# Altium footprint library KF127-5.08-2P.PcbLib: 1 footprints
Each footprint in its own frame and in the unit in brackets; x right, y up, seen from the top. Pads: shape width x height; smd on the part's side, far side on the other; paste and mask are expansions set on the pad; w line width, h text height; cw(c..) or ccw(c..) is an arc to the next point about the centre after c.
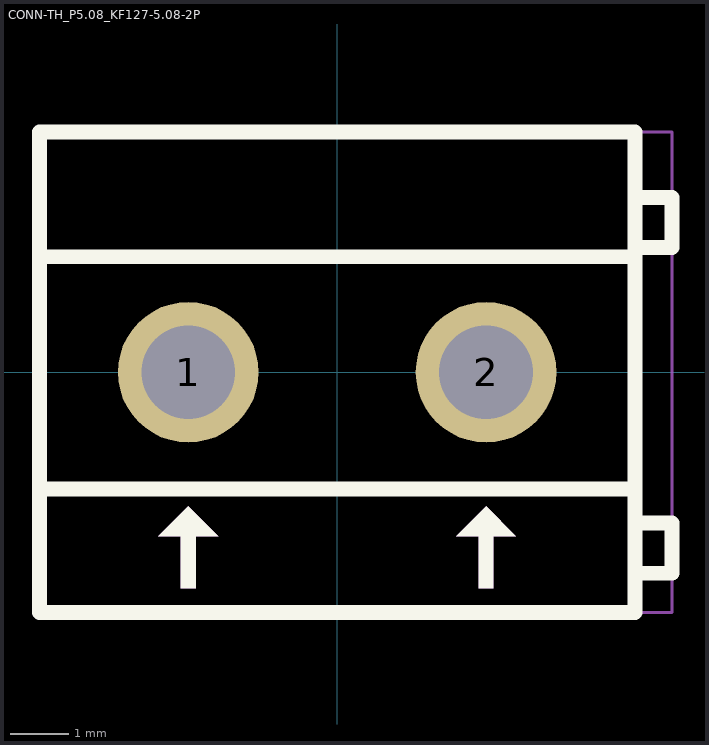
[diagram p0: the footprint, top view; thin cyan lines are the x and y axes]

## CONN-TH_P5.08_KF127-5.08-2P [mm]
pads (2):
  round 2.4 hole 1.6: 1(-2.54,0) 2(2.54,0)
Top Overlay:
  region: 2.54,-2.286 2.032,-2.794 2.413,-2.794 2.413,-3.683 2.667,-3.683 2.667,-2.794 3.048,-2.794
  region: -2.54,-2.286 -3.048,-2.794 -2.667,-2.794 -2.667,-3.683 -2.413,-3.683 -2.413,-2.794 -2.032,-2.794
  lines w0.254: -5.08,-1.993 5.08,-1.993 ; -5.08,1.97 5.08,1.97 ; 5.08,-3.429 5.715,-3.429 5.715,-2.572 5.08,-2.572 ; 5.08,2.127 5.715,2.127 5.715,2.984 5.08,2.984 ; -5.08,-4.1 5.08,-4.1 5.08,4.1 -5.08,4.1 -5.08,-4.1
Mechanical 2:
  region: 2.54,-2.286 2.032,-2.794 2.413,-2.794 2.413,-3.683 2.667,-3.683 2.667,-2.794 3.048,-2.794
  region: -2.54,-2.286 -3.048,-2.794 -2.667,-2.794 -2.667,-3.683 -2.413,-3.683 -2.413,-2.794 -2.032,-2.794
Mechanical 6:
  lines w0.051: -5.08,-4.1 -5.08,4.1 5.715,4.1 5.715,-4.1 -5.08,-4.1
Mechanical 8:
  region: -5.02,-4.1 -5.02,-4.125 -5.055,-4.16 -5.105,-4.16 -5.14,-4.125 -5.14,-4.1 -5.14,-4.075 -5.105,-4.04 -5.055,-4.04 -5.02,-4.075 -5.02,-4.1
Mechanical 9:
  region: 3.24,0 3.24,-0.092 3.192,-0.27 3.1,-0.43 2.97,-0.56 2.81,-0.652 2.632,-0.7 2.448,-0.7 2.27,-0.652 2.11,-0.56 1.98,-0.43 1.888,-0.27 1.84,-0.092 1.84,0 1.84,0.092 1.888,0.27 1.98,0.43 2.11,0.56 2.27,0.652 2.448,0.7 2.632,0.7 2.81,0.652 2.97,0.56 3.1,0.43 3.192,0.27 3.24,0.092 3.24,0
  region: -1.84,0 -1.84,-0.092 -1.888,-0.27 -1.98,-0.43 -2.11,-0.56 -2.27,-0.652 -2.448,-0.7 -2.632,-0.7 -2.81,-0.652 -2.97,-0.56 -3.1,-0.43 -3.192,-0.27 -3.24,-0.092 -3.24,0 -3.24,0.092 -3.192,0.27 -3.1,0.43 -2.97,0.56 -2.81,0.652 -2.632,0.7 -2.448,0.7 -2.27,0.652 -2.11,0.56 -1.98,0.43 -1.888,0.27 -1.84,0.092 -1.84,0